# Altium footprint library Miscellaneous Devices.PcbLib: 306 footprints (part 9 of 20)
Each footprint in its own frame and in the unit in brackets; x right, y up, seen from the top. Pads: shape width x height; smd on the part's side, far side on the other; paste and mask are expansions set on the pad; w line width, h text height; cw(c..) or ccw(c..) is an arc to the next point about the centre after c.
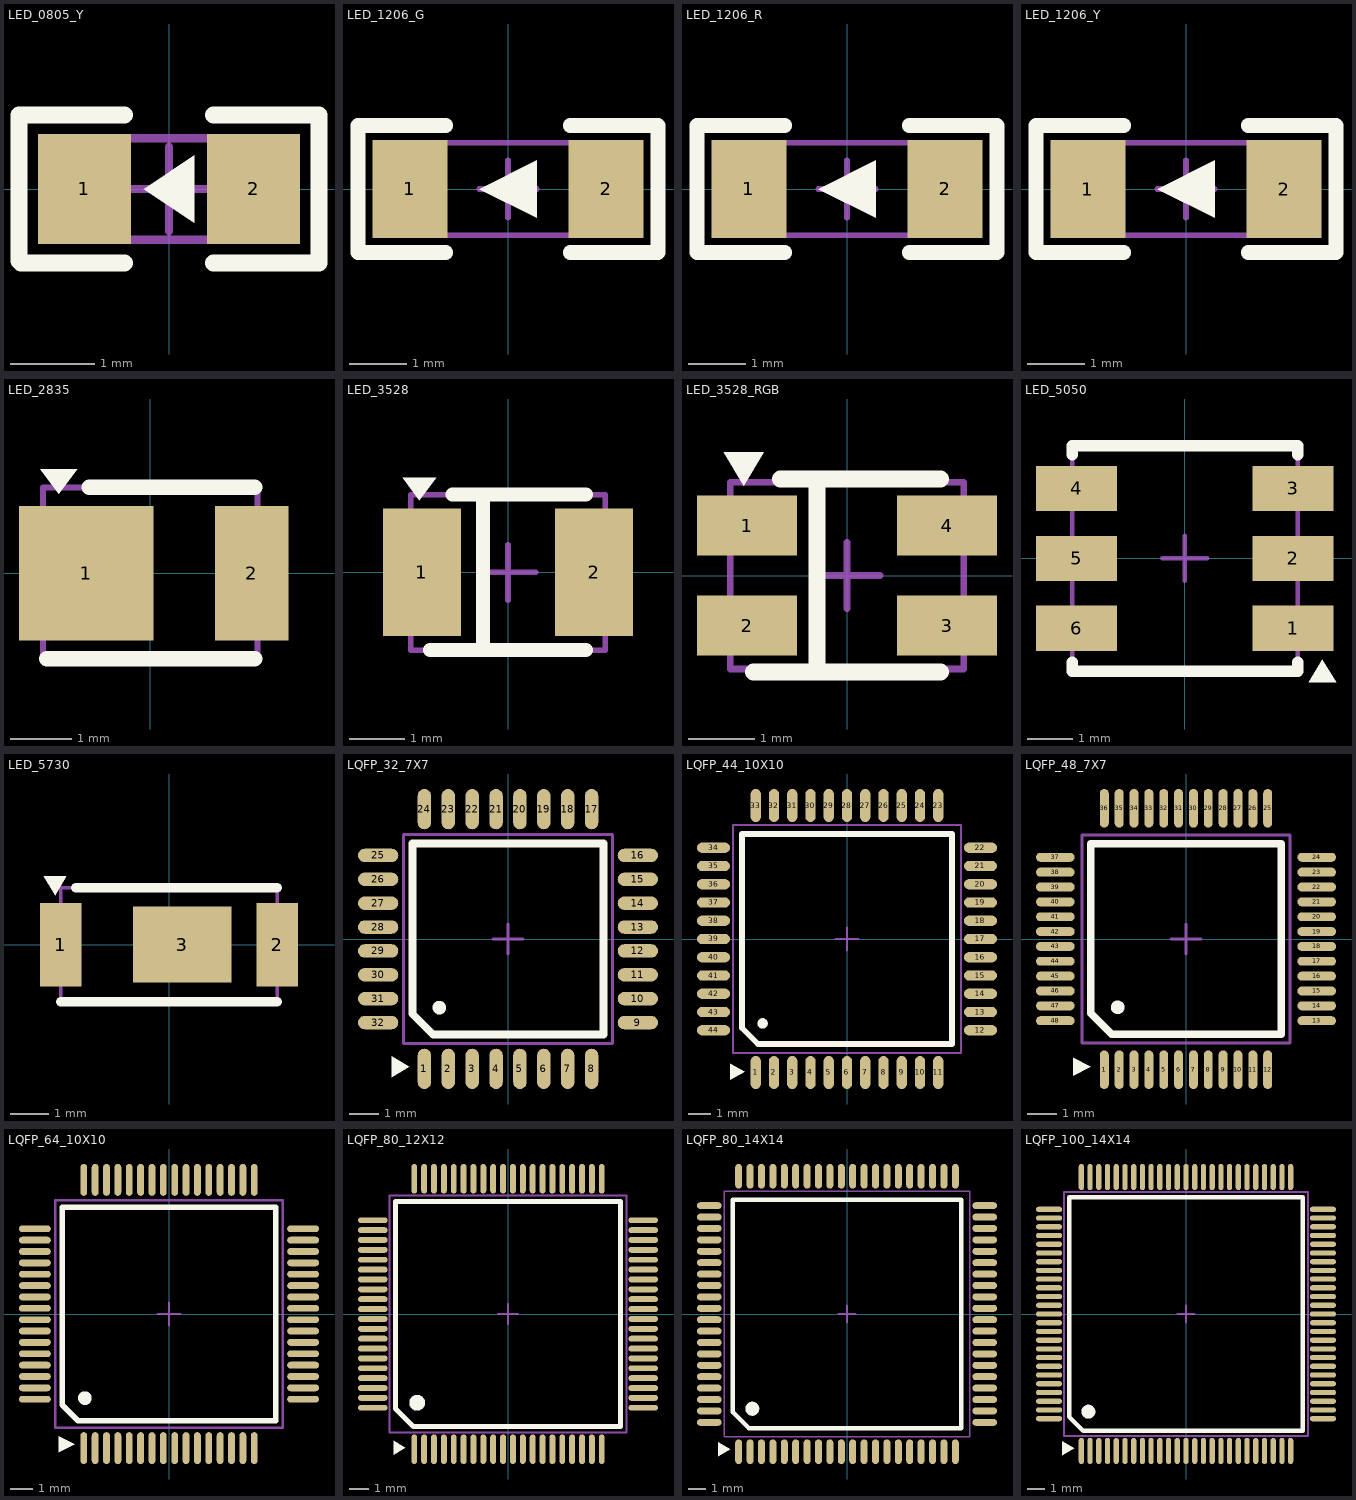
[diagram p8: the footprints below, top view; thin cyan lines are the x and y axes]

## LED_0805_Y [mm]
pads (2):
  rect 1.1x1.3 smd: 1(-1,0) 2(1,0)
Top Overlay:
  region: -0.3,0 0.3,-0.4 0.3,0.4
  lines w0.2: -1.775,-0.85 -1.775,0.875 -0.525,0.875 ; -1.75,-0.875 -0.525,-0.875 ; 0.525,-0.875 1.775,-0.875 1.775,0.875 0.525,0.875
Mechanical 15:
  lines w0.1: -0.5,0 0.5,0 ; 0,-0.5 0,0.5 ; -1,-0.6 -1,0.6 1,0.6 1,-0.6 -1,-0.6
3D body: height 1.1, standoff 0, extent -1.01,-0.625 1.01,0.625

## LED_1206_G [mm]
pads (2):
  rect 1.3x1.7 smd: 1(-1.7,0) 2(1.7,0)
Top Overlay:
  region: 0.5,-0.5 0.5,0.5 -0.5,0
  lines w0.254: -1.079,-1.1 -2.6,-1.1 -2.6,1.1 -1.079,1.1 ; 1.079,-1.1 2.6,-1.1 2.6,1.1 1.079,1.1
Mechanical 15:
  lines w0.1: -0.5,0 0.5,0 ; 0,-0.5 0,0.5 ; -1.6,-0.8 1.6,-0.8 1.6,0.8 -1.6,0.8 -1.6,-0.8
3D body: height 1.11, standoff -0.4, extent -1.6,-0.8 1.6,0.8

## LED_1206_R [mm]
pads (2):
  rect 1.3x1.7 smd: 1(-1.7,0) 2(1.7,0)
Top Overlay:
  region: 0.5,-0.5 0.5,0.5 -0.5,0
  lines w0.254: -1.079,-1.1 -2.6,-1.1 -2.6,1.1 -1.079,1.1 ; 1.08,-1.1 2.6,-1.1 2.6,1.1 1.08,1.1
Mechanical 15:
  lines w0.1: -0.5,0 0.5,0 ; 0,-0.5 0,0.5 ; -1.6,-0.8 1.6,-0.8 1.6,0.8 -1.6,0.8 -1.6,-0.8
3D body: height 1.11, standoff -0.4, extent -1.6,-0.8 1.6,0.8

## LED_1206_Y [mm]
pads (2):
  rect 1.3x1.7 smd: 1(-1.7,0) 2(1.7,0)
Top Overlay:
  region: 0.5,-0.5 0.5,0.5 -0.5,0
  lines w0.254: -1.079,-1.1 -2.6,-1.1 -2.6,1.1 -1.079,1.1 ; 1.08,-1.1 2.6,-1.1 2.6,1.1 1.08,1.1
Mechanical 15:
  lines w0.1: -0.5,0 0.5,0 ; 0,-0.5 0,0.5 ; -1.6,-0.8 1.6,-0.8 1.6,0.8 -1.6,0.8 -1.6,-0.8
3D body: height 1.11, standoff -0.4, extent -1.6,-0.8 1.6,0.8

## LED_2835 [mm]
pads (2):
  rect 2.2x2.2 smd: 1(-1.044,0)
  rect 1.2x2.2 smd: 2(1.656,0)
Top Overlay:
  region: -1.794,1.7 -1.194,1.7 -1.494,1.3
  lines w0.254: -1.694,-1.4 1.706,-1.4 ; -0.994,1.4 1.706,1.4
Mechanical 15:
  lines w0.1: -1.75,-1.4 -1.75,1.4 1.75,1.4 1.75,-1.4 -1.75,-1.4
3D body: height 0.72, standoff 0, extent -1.756,-1.4 1.756,1.4

## LED_3528 [mm]
pads (2):
  rect 1.4x2.3 smd: 1(-1.55,0) 2(1.55,0)
Top Overlay:
  region: -1.894,1.7 -1.294,1.7 -1.594,1.3
  lines w0.254: -1.4,-1.4 1.4,-1.4 ; -1,1.4 1.4,1.4 ; -0.45,-1.4 -0.45,1.4
Mechanical 15:
  lines w0.1: -0.5,0 0.5,0 ; 0,-0.5 0,0.5 ; -1.75,-1.4 -1.75,1.4 1.75,1.4 1.75,-1.4 -1.75,-1.4
3D body: height 1.86, standoff 0, extent -1.75,-1.4 1.75,1.4

## LED_3528_RGB [mm]
pads (4):
  rect 1.5x0.9 smd: 1(-1.5,0.75) 2(-1.5,-0.75) 3(1.5,-0.75) 4(1.5,0.75)
Top Overlay:
  region: -1.85,1.85 -1.25,1.85 -1.55,1.35
  lines w0.254: -1.4,-1.447 1.4,-1.447 ; -1,1.453 1.4,1.453 ; -0.45,-1.447 -0.45,1.453
Mechanical 15:
  lines w0.1: -0.5,0.003 0.5,0.003 ; 0,-0.497 0,0.503 ; -1.75,-1.4 1.75,-1.4 1.75,1.4 -1.75,1.4 -1.75,-1.4
3D body: height 1.9, standoff 0, extent -1.75,-1.4 1.75,1.4

## LED_5050 [mm]
pads (6):
  rect 1.8x1 smd: 1(2.4,-1.55) 2(2.4,0) 3(2.4,1.55) 4(-2.4,1.55) 5(-2.4,0) 6(-2.4,-1.55)
Top Overlay:
  region: 2.75,-2.75 3.35,-2.75 3.05,-2.25
  lines w0.254: -2.5,-2.3 -2.5,-2.5 2.5,-2.5 2.5,-2.3 ; -2.5,2.3 -2.5,2.5 2.5,2.5 2.5,2.3
Mechanical 15:
  lines w0.1: -0.5,0 0.5,0 ; 0,-0.5 0,0.5 ; -2.5,-2.5 -2.5,2.5 2.5,2.5 2.5,-2.5 -2.5,-2.5
3D body: height 1.6, standoff 0, extent -2.65,-2.5 2.65,2.5

## LED_5730 [mm]
pads (3):
  rect 1.1x2.2 smd: 1(-2.85,0) 2(2.85,0)
  rect 2.6x2 smd: 3(0.35,0)
Top Overlay:
  region: -3.3,1.8 -2.7,1.8 -3,1.3
  lines w0.254: -2.85,-1.5 2.85,-1.5 ; -2.45,1.5 2.85,1.5
Mechanical 15:
  lines w0.1: -2.85,-1.5 2.85,-1.5 2.85,1.5 -2.85,1.5 -2.85,-1.5
3D body: height 0.9, standoff 0, extent -2.85,-1.5 2.85,1.5

## LQFP_32_7X7 [mm]
pads (32):
  oval 0.45x1.35 smd: 1(-2.8,-4.35) 2(-2,-4.35) 3(-1.2,-4.35) 4(-0.4,-4.35) 5(0.4,-4.35) 6(1.2,-4.35) 7(2,-4.35) 8(2.8,-4.35) 17(2.8,4.35) 18(2,4.35) 19(1.2,4.35) 20(0.4,4.35) 21(-0.4,4.35) 22(-1.2,4.35) 23(-2,4.35) 24(-2.8,4.35)
  oval 1.35x0.45 smd: 9(4.35,-2.8) 10(4.35,-2) 11(4.35,-1.2) 12(4.35,-0.4) 13(4.35,0.4) 14(4.35,1.2) 15(4.35,2) 16(4.35,2.8) 25(-4.35,2.8) 26(-4.35,2) 27(-4.35,1.2) 28(-4.35,0.4) 29(-4.35,-0.4) 30(-4.35,-1.2) 31(-4.35,-2) 32(-4.35,-2.8)
Top Overlay:
  circle w0.254: c-2.3,-2.3 r0.1
  region: -3.3,-4.275 -3.9,-3.925 -3.9,-4.625
  lines w0.254: -3.2,-2.5 -3.2,3.2 3.2,3.2 3.2,-3.2 -2.5,-3.2 -3.2,-2.5
Mechanical 15:
  lines w0.1: -0.5,0 0.5,0 ; 0,-0.5 0,0.5 ; -3.5,-3.5 -3.5,3.5 3.5,3.5 3.5,-3.5 -3.5,-3.5
3D body: height 1.62, standoff -0.01, extent -4.572,-4.57 4.572,4.573

## LQFP_44_10X10 [mm]
pads (44):
  oval 0.45x1.45 smd: 1(-4,-5.85) 2(-3.2,-5.85) 3(-2.4,-5.85) 4(-1.6,-5.85) 5(-0.8,-5.85) 6(0,-5.85) 7(0.8,-5.85) 8(1.6,-5.85) 9(2.4,-5.85) 10(3.2,-5.85) 11(4,-5.85) 23(4,5.85) 24(3.2,5.85) 25(2.4,5.85) 26(1.6,5.85) 27(0.8,5.85) 28(0,5.85) 29(-0.8,5.85) 30(-1.6,5.85) 31(-2.4,5.85) 32(-3.2,5.85) 33(-4,5.85)
  oval 1.45x0.45 smd: 12(5.85,-4) 13(5.85,-3.2) 14(5.85,-2.4) 15(5.85,-1.6) 16(5.85,-0.8) 17(5.85,0) 18(5.85,0.8) 19(5.85,1.6) 20(5.85,2.4) 21(5.85,3.2) 22(5.85,4) 34(-5.85,4) 35(-5.85,3.2) 36(-5.85,2.4) 37(-5.85,1.6) 38(-5.85,0.8) 39(-5.85,0) 40(-5.85,-0.8) 41(-5.85,-1.6) 42(-5.85,-2.4) 43(-5.85,-3.2) 44(-5.85,-4)
Top Overlay:
  circle w0.254: c-3.7,-3.7 r0.1
  region: -4.488,-5.825 -5.113,-5.475 -5.113,-6.175
  lines w0.254: -4.6,-3.9 -3.9,-4.6 4.6,-4.6 4.6,4.6 -4.6,4.6 -4.6,-3.9
Mechanical 15:
  lines w0.1: -0.5,0 0.5,0 ; 0,-0.5 0,0.5 ; -5,-5 5,-5 5,5 -5,5 -5,-5
3D body: height 1.5, standoff 0.02, extent -6,-6 6,6

## LQFP_48_7X7 [mm]
pads (48):
  oval 0.3x1.3 smd: 1(-2.75,-4.4) 2(-2.25,-4.4) 3(-1.75,-4.4) 4(-1.25,-4.4) 5(-0.75,-4.4) 6(-0.25,-4.4) 7(0.25,-4.4) 8(0.75,-4.4) 9(1.25,-4.4) 10(1.75,-4.4) 11(2.25,-4.4) 12(2.75,-4.4) 25(2.75,4.4) 26(2.25,4.4) 27(1.75,4.4) 28(1.25,4.4) 29(0.75,4.4) 30(0.25,4.4) 31(-0.25,4.4) 32(-0.75,4.4) 33(-1.25,4.4) 34(-1.75,4.4) 35(-2.25,4.4) 36(-2.75,4.4)
  oval 1.3x0.3 smd: 13(4.4,-2.75) 14(4.4,-2.25) 15(4.4,-1.75) 16(4.4,-1.25) 17(4.4,-0.75) 18(4.4,-0.25) 19(4.4,0.25) 20(4.4,0.75) 21(4.4,1.25) 22(4.4,1.75) 23(4.4,2.25) 24(4.4,2.75) 37(-4.4,2.75) 38(-4.4,2.25) 39(-4.4,1.75) 40(-4.4,1.25) 41(-4.4,0.75) 42(-4.4,0.25) 43(-4.4,-0.25) 44(-4.4,-0.75) 45(-4.4,-1.25) 46(-4.4,-1.75) 47(-4.4,-2.25) 48(-4.4,-2.75)
Top Overlay:
  circle w0.254: c-2.3,-2.3 r0.1
  region: -3.2,-4.3 -3.8,-4 -3.8,-4.6
  lines w0.254: -3.2,-2.5 -3.2,3.2 3.2,3.2 3.2,-3.2 -2.5,-3.2 -3.2,-2.5
Mechanical 15:
  lines w0.1: -0.5,0 0.5,0 ; 0,-0.5 0,0.5 ; -3.5,-3.5 -3.5,3.5 3.5,3.5 3.5,-3.5 -3.5,-3.5
3D body: height 1.62, standoff -0.01, extent -4.572,-4.57 4.572,4.573

## LQFP_64_10X10 [mm]
pads (64):
  oval 0.3x1.4 smd: 1(-3.75,-5.9) 2(-3.25,-5.9) 3(-2.75,-5.9) 4(-2.25,-5.9) 5(-1.75,-5.9) 6(-1.25,-5.9) 7(-0.75,-5.9) 8(-0.25,-5.9) 9(0.25,-5.9) 10(0.75,-5.9) 11(1.25,-5.9) 12(1.75,-5.9) 13(2.25,-5.9) 14(2.75,-5.9) 15(3.25,-5.9) 16(3.75,-5.9) 33(3.75,5.9) 34(3.25,5.9) 35(2.75,5.9) 36(2.25,5.9) 37(1.75,5.9) 38(1.25,5.9) 39(0.75,5.9) 40(0.25,5.9) 41(-0.25,5.9) 42(-0.75,5.9) 43(-1.25,5.9) 44(-1.75,5.9) 45(-2.25,5.9) 46(-2.75,5.9) 47(-3.25,5.9) 48(-3.75,5.9)
  oval 1.4x0.3 smd: 17(5.9,-3.75) 18(5.9,-3.25) 19(5.9,-2.75) 20(5.9,-2.25) 21(5.9,-1.75) 22(5.9,-1.25) 23(5.9,-0.75) 24(5.9,-0.25) 25(5.9,0.25) 26(5.9,0.75) 27(5.9,1.25) 28(5.9,1.75) 29(5.9,2.25) 30(5.9,2.75) 31(5.9,3.25) 32(5.9,3.75) 49(-5.9,3.75) 50(-5.9,3.25) 51(-5.9,2.75) 52(-5.9,2.25) 53(-5.9,1.75) 54(-5.9,1.25) 55(-5.9,0.75) 56(-5.9,0.25) 57(-5.9,-0.25) 58(-5.9,-0.75) 59(-5.9,-1.25) 60(-5.9,-1.75) 61(-5.9,-2.25) 62(-5.9,-2.75) 63(-5.9,-3.25) 64(-5.9,-3.75)
Top Overlay:
  circle w0.4: c-3.7,-3.7 r0.1
  region: -4.15,-5.725 -4.85,-5.375 -4.85,-6.075
  lines w0.254: -4.7,-4 -4.7,4.7 4.7,4.7 4.7,-4.7 -4,-4.7 -4.7,-4
Mechanical 15:
  lines w0.1: -0.5,0 0.5,0 ; 0,-0.5 0,0.5 ; -5,-5 5,-5 5,5 -5,5 -5,-5
3D body: height 1.62, standoff -0.01, extent -6.072,-6.07 6.072,6.073

## LQFP_80_12X12 [mm]
pads (80):
  oval 0.3x1.5 smd: 1(-4.75,-6.85) 2(-4.25,-6.85) 3(-3.75,-6.85) 4(-3.25,-6.85) 5(-2.75,-6.85) 6(-2.25,-6.85) 7(-1.75,-6.85) 8(-1.25,-6.85) 9(-0.75,-6.85) 10(-0.25,-6.85) 11(0.25,-6.85) 12(0.75,-6.85) 13(1.25,-6.85) 14(1.75,-6.85) 15(2.25,-6.85) 16(2.75,-6.85) 17(3.25,-6.85) 18(3.75,-6.85) 19(4.25,-6.85) 20(4.75,-6.85) 41(4.75,6.85) 42(4.25,6.85) 43(3.75,6.85) 44(3.25,6.85) 45(2.75,6.85) 46(2.25,6.85) 47(1.75,6.85) 48(1.25,6.85) 49(0.75,6.85) 50(0.25,6.85) 51(-0.25,6.85) 52(-0.75,6.85) 53(-1.25,6.85) 54(-1.75,6.85) 55(-2.25,6.85) 56(-2.75,6.85) 57(-3.25,6.85) 58(-3.75,6.85) 59(-4.25,6.85) 60(-4.75,6.85)
  oval 1.5x0.3 smd: 21(6.85,-4.75) 22(6.85,-4.25) 23(6.85,-3.75) 24(6.85,-3.25) 25(6.85,-2.75) 26(6.85,-2.25) 27(6.85,-1.75) 28(6.85,-1.25) 29(6.85,-0.75) 30(6.85,-0.25) 31(6.85,0.25) 32(6.85,0.75) 33(6.85,1.25) 34(6.85,1.75) 35(6.85,2.25) 36(6.85,2.75) 37(6.85,3.25) 38(6.85,3.75) 39(6.85,4.25) 40(6.85,4.75) 61(-6.85,4.75) 62(-6.85,4.25) 63(-6.85,3.75) 64(-6.85,3.25) 65(-6.85,2.75) 66(-6.85,2.25) 67(-6.85,1.75) 68(-6.85,1.25) 69(-6.85,0.75) 70(-6.85,0.25) 71(-6.85,-0.25) 72(-6.85,-0.75) 73(-6.85,-1.25) 74(-6.85,-1.75) 75(-6.85,-2.25) 76(-6.85,-2.75) 77(-6.85,-3.25) 78(-6.85,-3.75) 79(-6.85,-4.25) 80(-6.85,-4.75)
Top Overlay:
  circle w0.4: c-4.6,-4.5 r0.2
  region: -5.2,-6.775 -5.8,-6.425 -5.8,-7.125
  lines w0.254: -5.7,-4.8 -5.7,5.7 5.7,5.7 5.7,-5.7 -4.8,-5.7 -5.7,-4.8
Mechanical 15:
  lines w0.1: -0.5,0 0.5,0 ; 0,-0.5 0,0.5 ; -6,-6 -6,6 6,6 6,-6 -6,-6
3D body: height 1.62, standoff -0.01, extent -7.073,-7.073 7.07,7.07

## LQFP_80_14X14 [mm]
pads (80):
  oval 0.4x1.4 smd mask+0.051: 1(-6.175,-7.85) 2(-5.525,-7.85) 3(-4.875,-7.85) 4(-4.225,-7.85) 5(-3.575,-7.85) 6(-2.925,-7.85) 7(-2.275,-7.85) 8(-1.625,-7.85) 9(-0.975,-7.85) 10(-0.325,-7.85) 11(0.325,-7.85) 12(0.975,-7.85) 13(1.625,-7.85) 14(2.275,-7.85) 15(2.925,-7.85) 16(3.575,-7.85) 17(4.225,-7.85) 18(4.875,-7.85) 19(5.525,-7.85) 20(6.175,-7.85) 41(6.175,7.85) 42(5.525,7.85) 43(4.875,7.85) 44(4.225,7.85) 45(3.575,7.85) 46(2.925,7.85) 47(2.275,7.85) 48(1.625,7.85) 49(0.975,7.85) 50(0.325,7.85) 51(-0.325,7.85) 52(-0.975,7.85) 53(-1.625,7.85) 54(-2.275,7.85) 55(-2.925,7.85) 56(-3.575,7.85) 57(-4.225,7.85) 58(-4.875,7.85) 59(-5.525,7.85) 60(-6.175,7.85)
  oval 1.4x0.4 smd mask+0.051: 21(7.85,-6.175) 22(7.85,-5.525) 23(7.85,-4.875) 24(7.85,-4.225) 25(7.85,-3.575) 26(7.85,-2.925) 27(7.85,-2.275) 28(7.85,-1.625) 29(7.85,-0.975) 30(7.85,-0.325) 31(7.85,0.325) 32(7.85,0.975) 33(7.85,1.625) 34(7.85,2.275) 35(7.85,2.925) 36(7.85,3.575) 37(7.85,4.225) 38(7.85,4.875) 39(7.85,5.525) 40(7.85,6.175) 61(-7.85,6.175) 62(-7.85,5.525) 63(-7.85,4.875) 64(-7.85,4.225) 65(-7.85,3.575) 66(-7.85,2.925) 67(-7.85,2.275) 68(-7.85,1.625) 69(-7.85,0.975) 70(-7.85,0.325) 71(-7.85,-0.325) 72(-7.85,-0.975) 73(-7.85,-1.625) 74(-7.85,-2.275) 75(-7.85,-2.925) 76(-7.85,-3.575) 77(-7.85,-4.225) 78(-7.85,-4.875) 79(-7.85,-5.525) 80(-7.85,-6.175)
Top Overlay:
  circle w0.4: c-5.4,-5.4 r0.2
  region: -7.35,-7.3 -7.35,-8.1 -6.65,-7.7
  lines w0.254: -6.5,-5.6 -5.6,-6.5 6.5,-6.5 6.5,6.5 -6.5,6.5 -6.5,-5.6
Mechanical 15:
  lines w0.1: -0.5,0 0.5,0 ; 0,-0.5 0,0.5 ; -7,-7 -7,7 7,7 7,-7 -7,-7
3D body: height 1.58, standoff -0.01, extent -8.005,-8 8.005,8.009

## LQFP_100_14X14 [mm]
pads (100):
  oval 0.3x1.5 smd: 1(-6,-7.85) 2(-5.5,-7.85) 3(-5,-7.85) 4(-4.5,-7.85) 5(-4,-7.85) 6(-3.5,-7.85) 7(-3,-7.85) 8(-2.5,-7.85) 9(-2,-7.85) 10(-1.5,-7.85) 11(-1,-7.85) 12(-0.5,-7.85) 13(0,-7.85) 14(0.5,-7.85) 15(1,-7.85) 16(1.5,-7.85) 17(2,-7.85) 18(2.5,-7.85) 19(3,-7.85) 20(3.5,-7.85) 21(4,-7.85) 22(4.5,-7.85) 23(5,-7.85) 24(5.5,-7.85) 25(6,-7.85) 51(6,7.85) 52(5.5,7.85) 53(5,7.85) 54(4.5,7.85) 55(4,7.85) 56(3.5,7.85) 57(3,7.85) 58(2.5,7.85) 59(2,7.85) 60(1.5,7.85) 61(1,7.85) 62(0.5,7.85) 63(0,7.85) 64(-0.5,7.85) 65(-1,7.85) 66(-1.5,7.85) 67(-2,7.85) 68(-2.5,7.85) 69(-3,7.85) 70(-3.5,7.85) 71(-4,7.85) 72(-4.5,7.85) 73(-5,7.85) 74(-5.5,7.85) 75(-6,7.85)
  oval 1.5x0.3 smd: 26(7.85,-6) 27(7.85,-5.5) 28(7.85,-5) 29(7.85,-4.5) 30(7.85,-4) 31(7.85,-3.5) 32(7.85,-3) 33(7.85,-2.5) 34(7.85,-2) 35(7.85,-1.5) 36(7.85,-1) 37(7.85,-0.5) 38(7.85,0) 39(7.85,0.5) 40(7.85,1) 41(7.85,1.5) 42(7.85,2) 43(7.85,2.5) 44(7.85,3) 45(7.85,3.5) 46(7.85,4) 47(7.85,4.5) 48(7.85,5) 49(7.85,5.5) 50(7.85,6) 76(-7.85,6) 77(-7.85,5.5) 78(-7.85,5) 79(-7.85,4.5) 80(-7.85,4) 81(-7.85,3.5) 82(-7.85,3) 83(-7.85,2.5) 84(-7.85,2) 85(-7.85,1.5) 86(-7.85,1) 87(-7.85,0.5) 88(-7.85,0) 89(-7.85,-0.5) 90(-7.85,-1) 91(-7.85,-1.5) 92(-7.85,-2) 93(-7.85,-2.5) 94(-7.85,-3) 95(-7.85,-3.5) 96(-7.85,-4) 97(-7.85,-4.5) 98(-7.85,-5) 99(-7.85,-5.5) 100(-7.85,-6)
Top Overlay:
  circle w0.4: c-5.6,-5.6 r0.2
  region: -6.4,-7.7 -7.1,-7.3 -7.1,-8.1
  lines w0.254: -6.7,-5.9 -6.7,6.7 6.7,6.7 6.7,-6.7 -5.9,-6.7 -6.7,-5.9
Mechanical 15:
  lines w0.1: -0.5,0 0.5,0 ; 0,-0.5 0,0.5 ; -7,-7 7,-7 7,7 -7,7 -7,-7
3D body: height 1.62, standoff -0.01, extent -8.072,-8.08 8.072,8.063